# Altium schematic symbol library C320C104K5R5TA.SchLib: 1 symbol
Pins are listed as number, name and electrical type; pins without a type are passive.

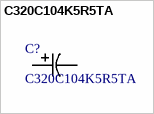
[diagram p0: symbol C320C104K5R5TA]

## C320C104K5R5TA
designator C?
Description; Manufacturer_Name: Kemet; Copyright: Copyright (C) 2025 Ultra Librarian. All rights reserved.; Manufacturer_Part_Number: C320C104K5R5TA
footprint CAP_C320_KEM
pins: 1, 2